# Altium footprint library FootPrintLib_8.PcbLib: 590 footprints (part 4 of 37)
Each footprint in its own frame and in the unit in brackets; x right, y up, seen from the top. Pads: shape width x height; smd on the part's side, far side on the other; paste and mask are expansions set on the pad; w line width, h text height; cw(c..) or ccw(c..) is an arc to the next point about the centre after c.
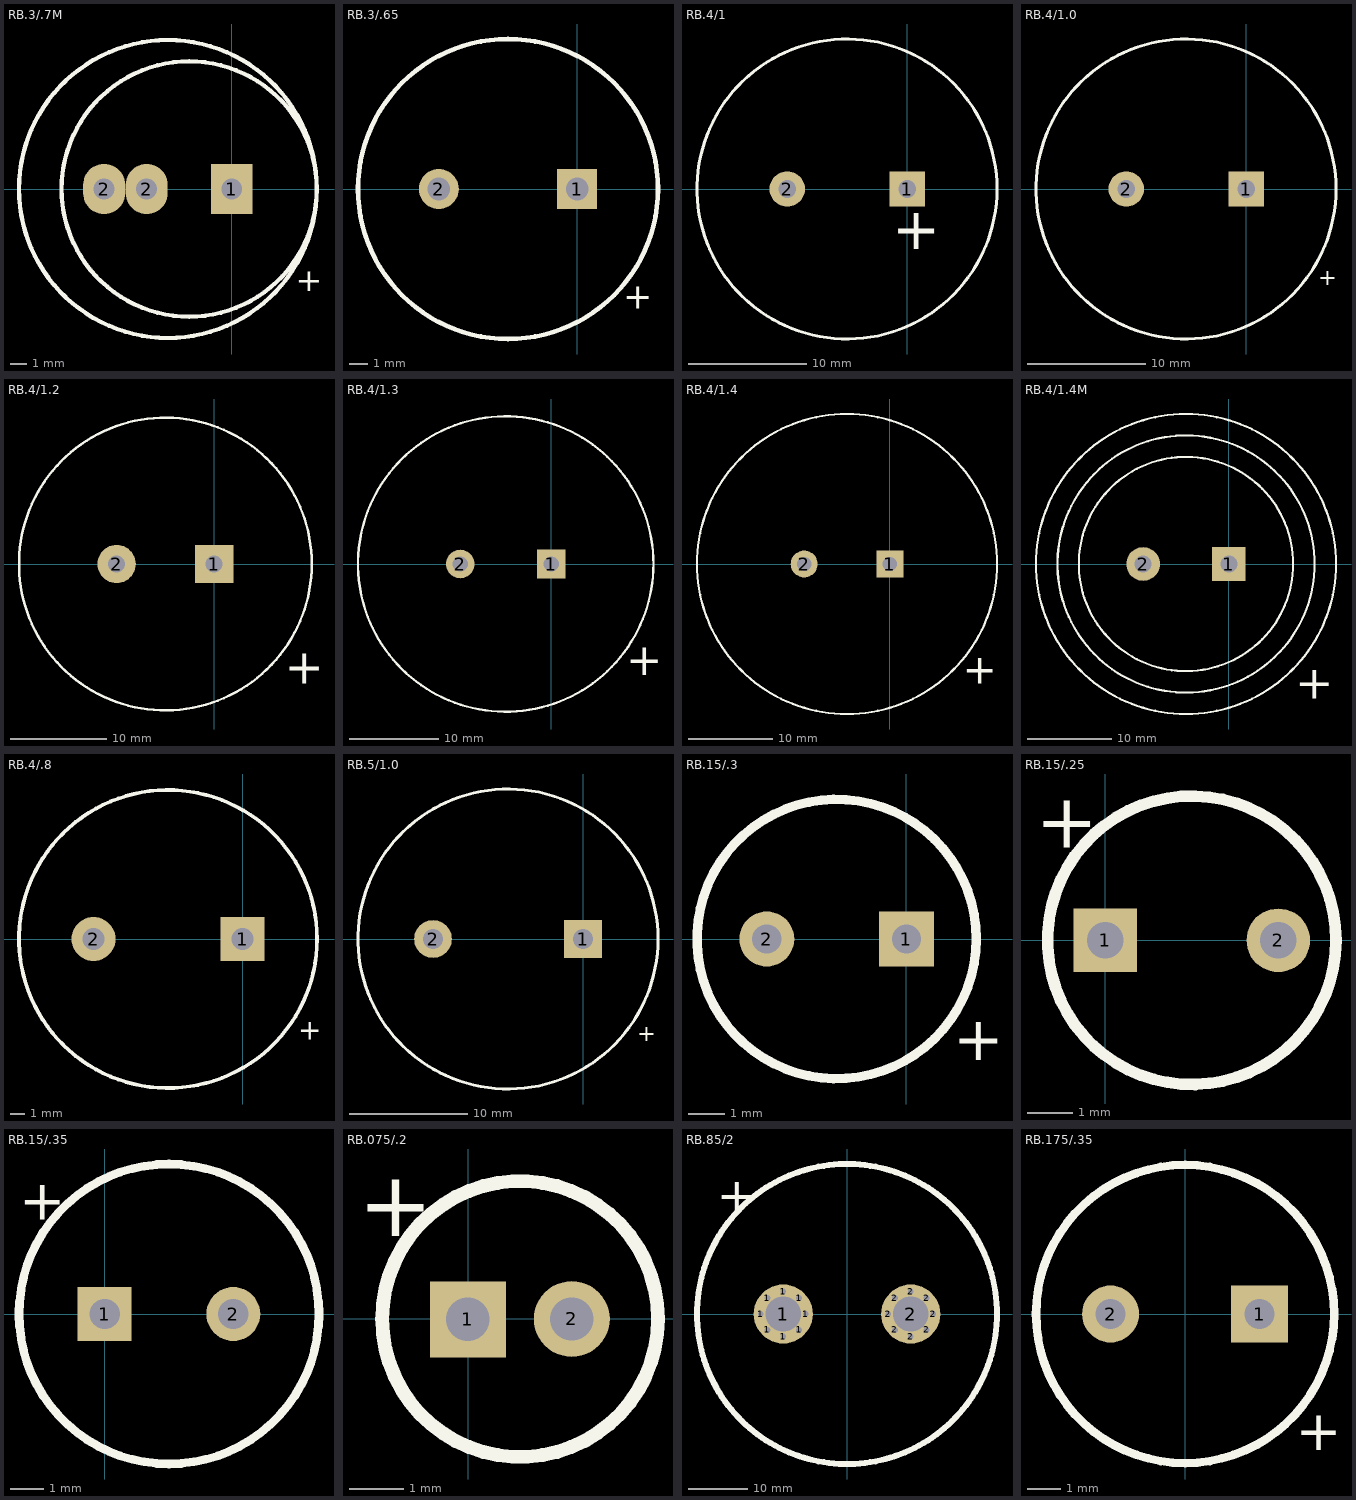
[diagram p3: the footprints below, top view; thin cyan lines are the x and y axes]

## RB.3/.7M [mm]
pads (3):
  rect 2.5x3 hole 1.25: 1(0,0)
  oval 2.5x3 hole 1.25: 2(-7.62,0) 2(-5.08,0)
Top Overlay:
  circle w0.254: c-3.81,0 r8.89
  circle w0.254: c-2.54,0 r7.62
  text "+" at 3.81,-6.096 h1.4

## RB.3/.65 [mm]
pads (2):
  rect 2.2x2.2 hole 1.25: 1(0,0)
  round 2.2 hole 1.25: 2(-7.62,0)
Top Overlay:
  circle w0.254: c-3.81,0 r8.255
  text "+" at 2.54,-6.604 h1.4

## RB.4/1 [mm]
pads (2):
  rect 3x3 hole 1.5: 1(0,0)
  round 3 hole 1.5: 2(-10.16,0)
Top Overlay:
  circle w0.254: c-5.1,0 r12.7
  text "+" at -1.27,-5.08 h3.56

## RB.4/1.0 [mm]
pads (2):
  rect 3x3 hole 1.5: 1(0,0)
  round 3 hole 1.5: 2(-10.16,0)
Top Overlay:
  circle w0.254: c-5.1,0 r12.7
  text "+" at 6.096,-8.128 h1.4

## RB.4/1.2 [mm]
pads (2):
  rect 4x4 hole 1.75: 1(0,0)
  round 4 hole 1.75: 2(-10.16,0)
Top Overlay:
  circle w0.254: c-5.08,0 r15.24
  text "+" at 7.366,-12.446 h3.56

## RB.4/1.3 [mm]
pads (2):
  rect 3.2x3.2 hole 1.7: 1(0,0)
  round 3.2 hole 1.7: 2(-10.16,0)
Top Overlay:
  circle w0.254: c-5.08,0 r16.51
  text "+" at 8.382,-12.446 h3.56

## RB.4/1.4 [mm]
pads (2):
  rect 3.2x3.2 hole 1.7: 1(0,0)
  round 3.2 hole 1.7: 2(-10.16,0)
Top Overlay:
  circle w0.254: c-5.08,0 r17.78
  text "+" at 8.636,-14.224 h3.56

## RB.4/1.4M [mm]
pads (2):
  rect 4x4 hole 2: 1(0,0)
  round 4 hole 2: 2(-10.16,0)
Top Overlay:
  circle w0.254: c-5.08,0 r15.24
  circle w0.254: c-5.08,0 r12.7
  circle w0.254: c-5.08,0 r17.78
  text "+" at 7.874,-16.002 h4

## RB.4/.8 [mm]
pads (2):
  rect 3x3 hole 1.5: 1(0,0)
  round 3 hole 1.5: 2(-10.16,0)
Top Overlay:
  circle w0.254: c-5.08,0 r10.16
  text "+" at 3.81,-6.858 h1.4

## RB.5/1.0 [mm]
pads (2):
  rect 3.2x3.2 hole 1.7: 1(0,0)
  round 3.2 hole 1.7: 2(-12.7,0)
Top Overlay:
  circle w0.254: c-6.35,0 r12.7
  text "+" at 4.572,-8.636 h1.4

## RB.15/.3 [mm]
pads (2):
  rect 1.5x1.5 hole 0.8: 1(0,0)
  round 1.5 hole 0.8: 2(-3.81,0)
Top Overlay:
  circle w0.254: c-1.905,0 r3.81
  text "+" at 1.27,-3.302 h1.2

## RB.15/.25 [mm]
pads (2):
  rect 1.4x1.4 hole 0.8: 1(0,0)
  round 1.4 hole 0.8: 2(3.81,0)
Top Overlay:
  circle w0.254: c1.905,0 r3.175
  text "+" at -1.524,2.032 h1.2

## RB.15/.35 [mm]
pads (2):
  rect 1.6x1.6 hole 0.9: 1(0,0)
  round 1.6 hole 0.9: 2(3.81,0)
Top Overlay:
  circle w0.254: c1.905,0 r4.445
  text "+" at -2.54,2.794 h1.2

## RB.075/.2 [mm]
pads (2):
  rect 1.4x1.4 hole 0.8: 1(-0.007,-0.006)
  round 1.4 hole 0.8: 2(1.905,0)
Top Overlay:
  circle w0.254: c0.953,0 r2.54
  text "+" at -2.032,1.524 h1.2

## RB.85/2 [mm]
pads (18):
  round 2 hole 1: 1(-14.605,0) 1(-13.489,-2.694) 1(-13.489,2.694) 1(-10.795,-3.81) 1(-10.795,3.81) 1(-8.101,-2.694) 1(-8.101,2.694) 1(-6.985,0) 2(6.985,0) 2(8.101,-2.694) 2(8.101,2.694) 2(10.795,-3.81) 2(10.795,3.81) 2(13.489,-2.694) 2(13.489,2.694) 2(14.605,0)
  round 10 hole 6: 1(-10.795,0) 2(10.795,0)
Top Overlay:
  circle w1: c0,0 r25.4
  text "+" at -22.098,17.272 h6

## RB.175/.35 [mm]
pads (2):
  rect 1.7x1.7 hole 0.9: 1(2.222,0)
  round 1.7 hole 0.9: 2(-2.222,0)
Top Overlay:
  circle w0.254: c0,0 r4.445
  text "+" at 3.302,-4.064 h1.2